# Altium footprint library 1.10-电容.PcbLib: 193 footprints (part 9 of 13)
Each footprint in its own frame and in the unit in brackets; x right, y up, seen from the top. Pads: shape width x height; smd on the part's side, far side on the other; paste and mask are expansions set on the pad; w line width, h text height; cw(c..) or ccw(c..) is an arc to the next point about the centre after c.
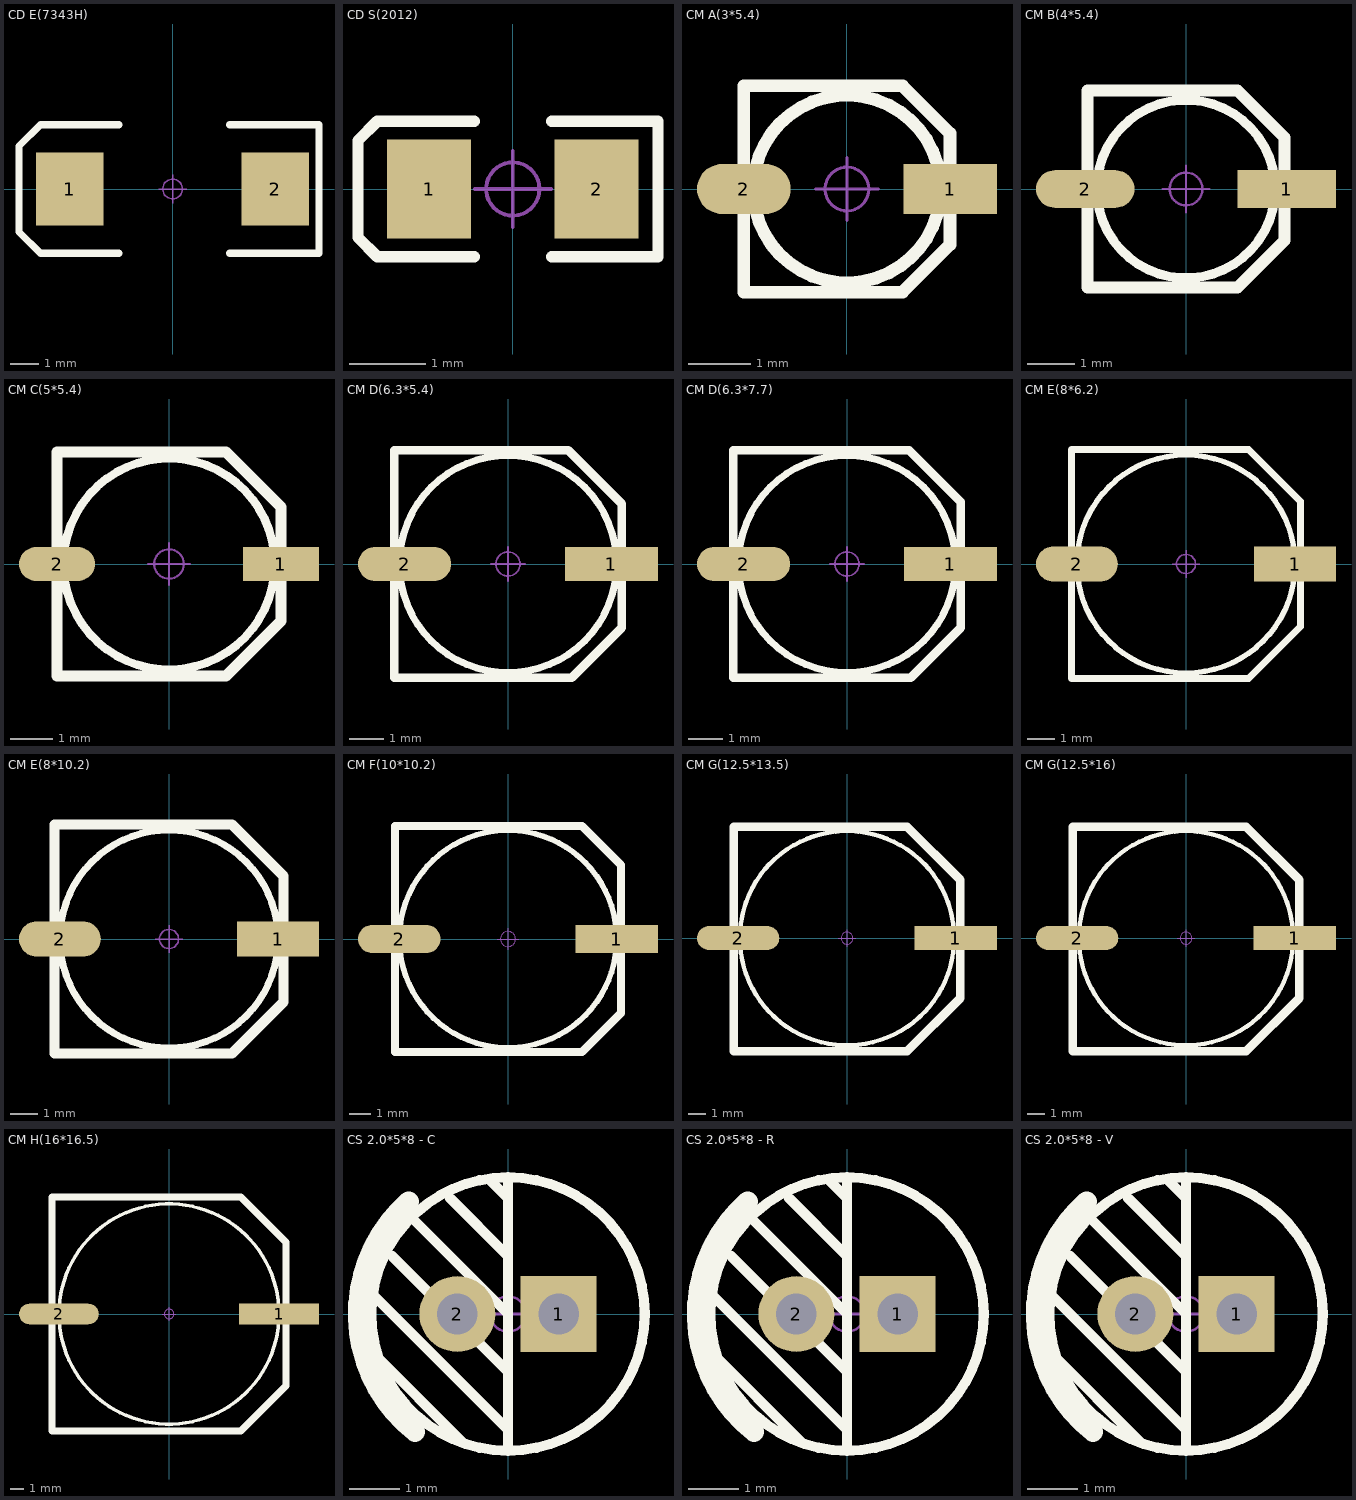
[diagram p8: the footprints below, top view; thin cyan lines are the x and y axes]

## CD E(7343H) [mm] "长7.3mm，宽4.3mm，厚4.0mm      淘宝ID:黄晶宝石"
pads (2):
  rect 2.4x2.6 smd: 1(-3.65,0) 2(3.65,0)
Top Overlay:
  lines w0.254: -1.905,-2.286 -4.699,-2.286 -5.461,-1.524 -5.461,1.524 -4.699,2.286 -1.905,2.286 ; 2.032,-2.286 5.207,-2.286 5.207,2.286 2.032,2.286
Mechanical 15:
  circle w0.05: c0,0 r0.35
  lines w0.05: -0.5,0 0.5,0 ; 0,-0.5 0,0.5
3D body "CD E(7343H).STEP": height 4, standoff -0.01, extent -3.65,-2.15 3.65,2.15

## CD S(2012) [mm] "长2.0mm，宽1.25mm，厚1.2mm               淘宝ID:黄晶宝石"
pads (2):
  rect 1.1x1.3 smd: 1(-1.1,0) 2(1.1,0)
Top Overlay:
  lines w0.15: -0.508,-0.889 -1.778,-0.889 -2.032,-0.635 -2.032,0.254 -2.032,0.635 -1.778,0.889 -0.508,0.889 ; 0.508,-0.889 1.905,-0.889 1.905,0.889 0.508,0.889
Mechanical 15:
  circle w0.05: c0,0 r0.35
  lines w0.05: -0.5,0 0.5,0 ; 0,-0.5 0,0.5
3D body "CD S(2012).STEP": height 1.2, standoff 0, extent -1,-0.6 1,0.6

## CM A(3*5.4) [mm] "贴片电解电容，直径3mm，高5.4mm         淘宝ID:黄晶宝石"
pads (2):
  rect 1.5x0.8 smd: 1(1.651,0)
  oval 1.5x0.8 smd: 2(-1.65,0)
Top Overlay:
  circle w0.203: c0,0 r1.5
  lines w0.203: -1.65,-1.65 0.89,-1.65 1.65,-0.89 1.65,0.89 0.89,1.65 -1.65,1.65 -1.65,-1.65
Mechanical 15:
  circle w0.05: c0,0 r0.35
  lines w0.05: -0.5,0 0.5,0 ; 0,-0.5 0,0.5
3D body "CM A(3X5.4).STEP": height 5.4, standoff -0.01, extent -1.9,-1.65 1.9,1.65

## CM B(4*5.4) [mm] "贴片电解电容，直径4mm，高5.4mm          淘宝ID:黄晶宝石"
pads (2):
  rect 2.1x0.8 smd: 1(2.15,0)
  oval 2.1x0.8 smd: 2(-2.15,0)
Top Overlay:
  circle w0.2: c0,0 r1.9
  lines w0.254: -2.1,-2.1 -2.1,2.1 1.1,2.1 2.1,1.1 2.1,-1.1 1.1,-2.1 -2.1,-2.1
Mechanical 15:
  circle w0.05: c0,0 r0.35
  lines w0.05: -0.5,0 0.5,0 ; 0,-0.5 0,0.5
3D body "CM B(4X5.4).STEP": height 5.4, standoff -0.01, extent -2.3,-2.125 2.3,2.175

## CM C(5*5.4) [mm] "贴片电解电容，直径5mm，高5.4mm            淘宝ID:黄晶宝石"
pads (2):
  rect 1.8x0.8 smd: 1(2.65,0)
  oval 1.8x0.8 smd: 2(-2.65,0)
Top Overlay:
  circle w0.2: c0,0 r2.5
  lines w0.254: -2.65,-2.65 -2.65,2.65 1.35,2.65 2.65,1.35 2.65,-1.35 1.35,-2.65 -2.65,-2.65
Mechanical 15:
  circle w0.05: c0,0 r0.35
  lines w0.05: -0.5,0 0.5,0 ; 0,-0.5 0,0.5
3D body "CM C(5X5.4).STEP": height 5.4, standoff -0.01, extent -2.95,-2.65 2.95,2.65

## CM D(6.3*5.4) [mm] "贴片电解电容，直径6.3mm，高5.4mm           淘宝ID:黄晶宝石"
height 5.4
pads (2):
  rect 2.7x1 smd: 1(3,0)
  oval 2.7x1 smd: 2(-3,0)
Top Overlay:
  circle w0.2: c0,0 r3.15
  lines w0.254: -3.3,-3.3 1.85,-3.3 3.3,-1.85 3.3,1.75 1.75,3.3 -3.3,3.3 -3.3,-3.3
Mechanical 15:
  circle w0.05: c0,0 r0.35
  lines w0.05: -0.5,0 0.5,0 ; 0,-0.5 0,0.5
3D body "CM D(6.3X5.4).STEP": height 5.4, standoff -0.01, extent -3.5,-3.3 3.5,3.3

## CM D(6.3*7.7) [mm] "贴片电解电容，直径6.3mm，高7.7mm         淘宝ID:黄晶宝石"
pads (2):
  rect 2.7x1 smd: 1(3,0)
  oval 2.7x1 smd: 2(-3,0)
Top Overlay:
  circle w0.2: c0,0 r3.15
  lines w0.254: -3.3,-3.3 1.85,-3.3 3.3,-1.85 3.3,1.8 1.8,3.3 -3.3,3.3 -3.3,-3.3
Mechanical 15:
  circle w0.05: c0,0 r0.35
  lines w0.05: -0.5,0 0.5,0 ; 0,-0.5 0,0.5
3D body "CM D(6.3X7.7).STEP": height 7.7, standoff -0.01, extent -3.5,-3.3 3.5,3.3

## CM E(8*6.2) [mm] "贴片电解电容，直径8mm，高6.2mm        淘宝ID:黄晶宝石"
pads (2):
  rect 3x1.3 smd: 1(4,0)
  oval 3x1.3 smd: 2(-4,0)
Top Overlay:
  circle w0.2: c0,0 r4
  lines w0.254: -4.2,-4.2 2.3,-4.2 4.2,-2.3 4.2,2.3 2.3,4.2 -4.2,4.2 -4.2,-4.2
Mechanical 15:
  circle w0.05: c0,0 r0.35
  lines w0.05: -0.5,0 0.5,0 ; 0,-0.5 0,0.5
3D body "CM E(8X6.2).STEP": height 6.2, standoff -0.01, extent -4.5,-4.15 4.5,4.15

## CM E(8*10.2) [mm] "贴片电解电容，直径8mm，高10.2mm        淘宝ID:黄晶宝石"
pads (2):
  rect 3x1.3 smd: 1(4,0)
  oval 3x1.3 smd: 2(-4,0)
Top Overlay:
  circle w0.254: c0,0 r4
  lines w0.381: -4.2,-4.2 -4.2,4.2 2.3,4.2 4.2,2.3 4.2,-2.3 2.3,-4.2 -4.2,-4.2
Mechanical 15:
  circle w0.05: c0,0 r0.35
  lines w0.05: -0.5,0 0.5,0 ; 0,-0.5 0,0.5
3D body "CM E(8X10.2).STEP": height 10.2, standoff -0.01, extent -4.5,-4.15 4.5,4.15

## CM F(10*10.2) [mm] "贴片电解电容，直径10mm，高10.2mm    淘宝ID:黄晶宝石"
pads (2):
  rect 3.8x1.3 smd: 1(5,0)
  oval 3.8x1.3 smd: 2(-5,0)
Top Overlay:
  circle w0.254: c0,0 r5
  lines w0.381: 5.191,-3.413 3.404,-5.2 -5.2,-5.2 -5.2,5.2 3.404,5.2 5.2,3.404 5.2,-3.404
Mechanical 15:
  circle w0.05: c0,0 r0.35
  lines w0.05: -0.5,0 0.5,0 ; 0,-0.5 0,0.5
3D body "CM F(10X10.2).STEP": height 10.2, standoff -0.01, extent -5.8,-5.15 5.8,5.15

## CM G(12.5*13.5) [mm] "贴片电解电容，直径12.5mm，高13.5mm        淘宝ID:黄晶宝石"
pads (2):
  rect 4.8x1.4 smd: 1(6.35,0)
  oval 4.8x1.4 smd: 2(-6.35,0)
Top Overlay:
  circle w0.254: c0,0 r6.25
  lines w0.508: -6.6,-6.6 -6.6,6.5 3.5,6.5 6.6,3.4 6.6,-3.5 3.5,-6.6 -6.6,-6.6
Mechanical 15:
  circle w0.05: c0,0 r0.35
  lines w0.05: -0.5,0 0.5,0 ; 0,-0.5 0,0.5
3D body "CM G(12.5X13.5).STEP": height 13.5, standoff -0.01, extent -7.15,-6.5 7.15,6.5

## CM G(12.5*16) [mm] "贴片电解电容，直径12.5mm，高16mm         淘宝ID:黄晶宝石"
pads (2):
  rect 4.8x1.4 smd: 1(6.35,0)
  oval 4.8x1.4 smd: 2(-6.35,0)
Top Overlay:
  circle w0.254: c0,0 r6.25
  lines w0.508: -6.6,-6.6 -6.6,6.5 3.5,6.5 6.6,3.4 6.6,-3.5 3.5,-6.6 -6.6,-6.6
Mechanical 15:
  circle w0.05: c0,0 r0.35
  lines w0.05: -0.5,0 0.5,0 ; 0,-0.5 0,0.5
3D body "CM G(12.5X16).STEP": height 16, standoff -0.01, extent -7.15,-6.5 7.15,6.5

## CM H(16*16.5) [mm] "贴片电解电容，直径16mm，高16.5mm"
pads (2):
  rect 5.8x1.5 smd: 1(8.001,0)
  oval 5.8x1.5 smd: 2(-8.001,0)
Top Overlay:
  circle w0.254: c0,0 r8
  lines w0.508: -8.5,-8.5 -8.5,8.5 5.216,8.5 8.5,5.216 8.5,-5.216 5.216,-8.5 -8.5,-8.5
Mechanical 15:
  circle w0.05: c0,0 r0.35
  lines w0.05: -0.5,0 0.5,0 ; 0,-0.5 0,0.5
3D body "CM H(16X16.5).STEP": height 16.5, standoff -0.01, extent -9.4,-8.5 9.4,8.5

## CS 2.0*5*8 - C [mm] "脚距2mm , 直径5mm , 高8mm"
pads (2):
  rect 1.5x1.5 hole 0.8: 1(1,0)
  round 1.5 hole 0.8: 2(-1,0)
Top Overlay:
  circle w0.2: c0,0 r2.7
  lines w0.2: -2.667,-0.762 -0.889,-2.54 ; -2.667,0.381 0,-2.286 ; -2.286,1.143 0,-1.143 ; -1.905,1.905 0,0 ; -1.143,2.286 0,1.143 ; -0.381,2.667 0,2.286 ; 0,-2.667 0,2.667
  lines w0.4: -1.96,2.221 ccw(c0,0) -1.835,-2.325
Mechanical 15:
  circle w0.05: c0,0 r0.35
  lines w0.05: -0.5,0 0.5,0 ; 0,-0.5 0,0.5
3D body "CS 5X8.STEP": height 8.02, standoff -3.48, extent -2.5,-2.5 2.5,2.5

## CS 2.0*5*8 - R [mm] "脚距2mm , 直径5mm , 高8mm                    淘宝ID:黄晶宝石"
pads (2):
  rect 1.5x1.5 hole 0.8: 1(1,0)
  round 1.5 hole 0.8: 2(-1,0)
Top Overlay:
  circle w0.2: c0,0 r2.7
  lines w0.2: -2.667,-0.762 -0.889,-2.54 ; -2.667,0.381 0,-2.286 ; -2.286,1.143 0,-1.143 ; -1.905,1.905 0,0 ; -1.143,2.286 0,1.143 ; -0.381,2.667 0,2.286 ; 0,-2.667 0,2.667
  lines w0.4: -1.96,2.221 ccw(c0,0) -1.835,-2.325
Mechanical 15:
  circle w0.05: c0,0 r0.35
  lines w0.05: -0.5,0 0.5,0 ; 0,-0.5 0,0.5
3D body "CS 5X8.STEP": height 8.02, standoff -3.48, extent -2.5,-2.5 2.5,2.5

## CS 2.0*5*8 - V [mm] "脚距2mm , 直径5mm , 高8mm                   淘宝ID:黄晶宝石"
pads (2):
  rect 1.5x1.5 hole 0.8: 1(1,0)
  round 1.5 hole 0.8: 2(-1,0)
Top Overlay:
  circle w0.2: c0,0 r2.7
  lines w0.2: -2.667,-0.762 -0.889,-2.54 ; -2.667,0.381 0,-2.286 ; -2.286,1.143 0,-1.143 ; -1.905,1.905 0,0 ; -1.143,2.286 0,1.143 ; -0.381,2.667 0,2.286 ; 0,-2.667 0,2.667
  lines w0.4: -1.96,2.221 ccw(c0,0) -1.835,-2.325
Mechanical 15:
  circle w0.05: c0,0 r0.35
  lines w0.05: -0.5,0 0.5,0 ; 0,-0.5 0,0.5
3D body "CS 5X8.STEP": height 8.02, standoff -3.48, extent -2.5,-2.5 2.5,2.5